# Altium footprint library custom-case.PcbLib: 483 footprints (part 6 of 31)
Each footprint in its own frame and in the unit in brackets; x right, y up, seen from the top. Pads: shape width x height; smd on the part's side, far side on the other; paste and mask are expansions set on the pad; w line width, h text height; cw(c..) or ccw(c..) is an arc to the next point about the centre after c.
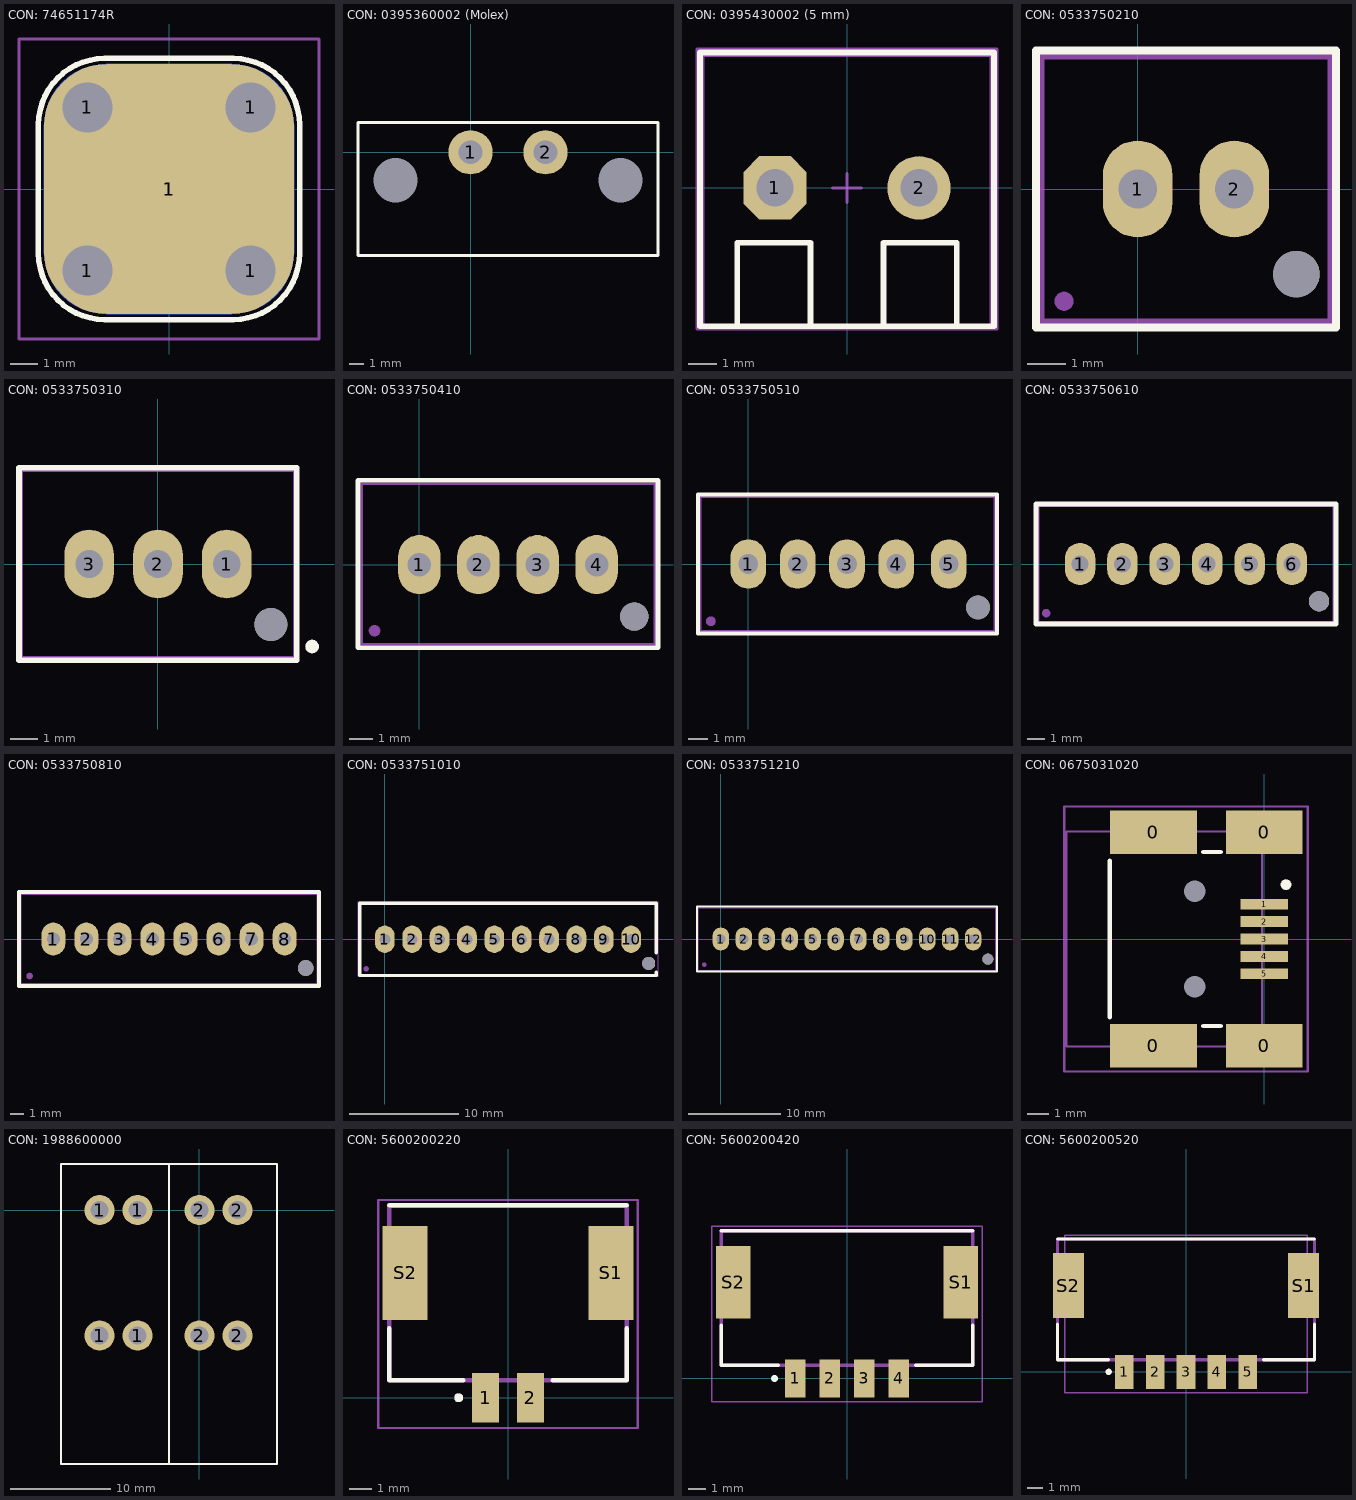
[diagram p5: the footprints below, top view; thin cyan lines are the x and y axes]

## CON: 74651174R [mm]
pads (6):
  round 2.5 hole 1.8: 1(-2.94,-2.94) 1(-2.94,2.94) 1(2.94,-2.94) 1(2.94,2.94)
  rrect50% 9x9 smd: 1(0,0)
  rrect50% 9x9 smd far side: 1(0,0)
Top Overlay:
  lines w0.2: -4.7,-2.31 ccw(c-2.31,-2.31) -2.31,-4.7 2.31,-4.7 ccw(c2.31,-2.31) 4.7,-2.31 4.7,2.31 ccw(c2.31,2.31) 2.31,4.7 -2.31,4.7 ccw(c-2.31,2.31) -4.7,2.31 -4.7,-2.31
Top Assy:
  circle w0.1: c0,0 r1.5
  lines w0.1: 0,2 ccw(c0,0) 2,0 ; -3.5,-3.5 -3.5,3.5 3.5,3.5 3.5,-3.5 -3.5,-3.5
Size Area:
  lines w0.1: -5.4,-5.4 -5.4,5.4 5.4,5.4 5.4,-5.4 -5.4,-5.4
3D body "74651174 (rev1).stp": height 8.5, standoff -2.5, extent -3.5,-3.5 3.5,3.5

## CON: 0395360002 (Molex) [mm]
pads (4):
  round 3 hole 1.6: 1(0,0) 2(5.08,0)
  round 0 hole 3: MH(-5.08,-1.9) MH(10.16,-1.9)
Top Overlay:
  lines w0.2: -7.625,-7 -7.625,2.025 12.7,2.025 12.7,-7 -7.625,-7
Top Assy:
  lines w0.1: -7.625,-7 12.7,-7 12.7,2.025 -7.625,2.025 -7.625,-7
Size Area:
  lines w0.1: -7.625,-7 -7.625,2.025 12.7,2.025 12.7,-7 -7.625,-7
3D body "395360002-1.STEP": height 8.47, standoff -3.72, extent -7.625,-10.07 12.695,2.02

## CON: 0395430002 (5 mm) [mm] "2 pin 5.08mm screw connector"
height 12.5
pads (2):
  oct 2.2x2.2 hole 1.3: 1(-2.5,0)
  round 2.2 hole 1.3: 2(2.5,0)
Top Overlay:
  lines w0.2: -3.81,-4.8 -3.81,-1.905 -1.27,-1.905 -1.27,-4.8 ; 1.27,-4.8 1.27,-1.905 3.81,-1.905 3.81,-4.8 ; -5.1,-4.8 -5.1,4.7 5.1,4.7 5.1,-4.8 -5.1,-4.8
Top Assy:
  lines w0.1: -3.8,-4.799 -3.8,-1.9 -1.3,-1.9 -1.3,-4.799 ; 1.3,-4.8 1.3,-1.9 3.8,-1.9 3.8,-4.799 ; -5.004,-4.799 5.004,-4.799 5.004,4.599 -5.004,4.599 -5.004,-4.799
Size Area:
  lines w0.1: -0.5,0 0.5,0 ; 0,-0.5 0,0.5 ; -5.207,-4.9 -5.207,4.826 5.207,4.826 5.207,-4.9 -5.207,-4.9
3D body "395430002.SLDPRT": height 14.63, standoff -3.43, extent -5.004,-4.799 5.004,4.599

## CON: 0533750210 [mm] "MOLEX Mini-Lock"
height 11.5
pads (4):
  oval 1.8x2.5 hole 1: 1(0,0) 2(2.5,0)
  round 0.5 on Mech1: ""(-1.9,-2.9)
  round 1.2 hole 1.2: ""(4.1,-2.2)
Top Overlay:
  lines w0.2: -2.625,-3.575 -2.625,3.575 5.125,3.575 5.125,-3.575 -2.625,-3.575
Top Assy:
  lines w0.1: -2.45,-3.4 -2.45,3.4 4.95,3.4 4.95,-3.4 -2.45,-3.4
Size Area:
  lines w0.1: -2.5,-3.5 5,-3.5 5,3.5 -2.5,3.5 -2.5,-3.5
3D body "533750210.stp": height 11.75, standoff -3.18, extent -2.45,-3.4 4.95,3.4

## CON: 0533750310 [mm]
pads (6):
  oval 1.8x2.5 hole 1: 1(2.5,0) 2(0,0) 3(-2.5,0)
  round 1.2 hole 1.2: ""(4.1,-2.2)
  round 0.5 on Mech1: ""(4.1,-2.2)
  round 0.5 on Top Overlay: ""(5.6,-3)
Top Overlay:
  lines w0.2: -5.05,-3.5 5.05,-3.5 5.05,3.5 -5.05,3.5 -5.05,-3.5
Top Assy:
  lines w0.1: -4.95,-3.4 -4.95,3.4 4.95,3.4 4.95,-3.4 -4.95,-3.4
Size Area:
  lines w0.1: -0.5,0 0.5,0 ; 0,-0.5 0,0.5 ; -5,-3.5 5,-3.5 5,3.5 -5,3.5 -5,-3.5
3D body "533750310.stp": height 11.55, standoff -3.38, extent -4.95,-3.4 4.95,3.4

## CON: 0533750410 [mm] "MOLEX Mini-Lock"
height 11.5
pads (6):
  oval 1.8x2.5 hole 1: 1(0,0) 2(2.5,0) 3(5,0) 4(7.5,0)
  round 0.5 on Mech1: ""(-1.9,-2.8)
  round 1.2 hole 1.2: ""(9.1,-2.2)
Top Overlay:
  lines w0.2: -2.6,-3.525 10.1,-3.525 10.1,3.575 -2.6,3.575 -2.6,-3.525
Top Assy:
  lines w0.1: -2.441,-3.374 9.959,-3.374 9.959,3.426 -2.441,3.426 -2.441,-3.374
3D body "533750410.stp": height 11.55, standoff -3.38, extent -2.441,-3.374 9.959,3.426

## CON: 0533750510 [mm] "MOLEX Mini-Lock"
height 11.5
pads (7):
  oval 1.8x2.5 hole 1: 1(0,0) 2(2.5,0) 3(5,0) 4(7.5,0) 5(10.16,0)
  round 0.5 on Mech1: ""(-1.9,-2.9)
  round 1.2 hole 1.2: ""(11.64,-2.2)
Top Overlay:
  lines w0.2: -2.55,-3.525 12.6,-3.525 12.6,3.525 -2.55,3.525 -2.55,-3.525
Top Assy:
  lines w0.1: -2.425,-3.4 -2.425,3.4 12.475,3.4 12.475,-3.4 -2.425,-3.4
Size Area:
  lines w0.1: -2.6,-3.5 12.6,-3.5 12.6,3.5 -2.6,3.5 -2.6,-3.5
3D body "533750510.stp": height 11.55, standoff -3.38, extent -2.425,-3.4 12.475,3.4

## CON: 0533750610 [mm] "MOLEX Mini-Lock"
height 11.5
pads (8):
  oval 1.8x2.5 hole 1: 1(10,0) 2(12.5,0) 3(15,0) 4(17.5,0) 5(20,0) 6(22.5,0)
  round 0.5 on Mech1: ""(8,-2.9)
  round 1.2 hole 1.2: ""(24.1,-2.2)
Top Overlay:
  lines w0.3: 7.4,-3.55 25.1,-3.55 25.1,3.55 7.4,3.55 7.4,-3.55
Top Assy:
  lines w0.1: 7.55,-3.4 7.55,3.4 24.95,3.4 24.95,-3.4 7.55,-3.4
3D body "533750610.stp": height 11.55, standoff -3.38, extent 7.55,-3.4 24.95,3.4

## CON: 0533750810 [mm] "MOLEX Mini-Lock"
height 11.5
pads (10):
  oval 1.8x2.5 hole 1: 1(5,0) 2(7.5,0) 3(10,0) 4(12.5,0) 5(15,0) 6(17.5,0) 7(20,0) 8(22.5,0)
  round 0.5 on Mech1: ""(3.2,-2.8)
  round 1.2 hole 1.2: ""(24.1,-2.2)
Top Overlay:
  lines w0.3: 2.4,-3.55 2.4,3.55 25.1,3.55 25.1,-3.55 2.4,-3.55
Top Assy:
  lines w0.1: 2.55,-3.4 2.55,3.4 24.95,3.4 24.95,-3.4 2.55,-3.4
3D body "533750810.stp": height 11.55, standoff -3.38, extent 2.55,-3.4 24.95,3.4

## CON: 0533751010 [mm] "MOLEX Mini-Lock"
height 11.5
pads (12):
  oval 1.8x2.5 hole 1: 1(0,0) 2(2.5,0) 3(5,0) 4(7.5,0) 5(10,0) 6(12.5,0) 7(15,0) 8(17.5,0) 9(20,0) 10(22.5,0)
  round 0.5 on Mech1: ""(-1.7,-2.7)
  round 1.2 hole 1.2: ""(24.1,-2.2)
Top Overlay:
  lines w0.3: 24.8,-3 24.8,-3.3 -2.3,-3.3 -2.3,3.3 24.8,3.3 24.8,-1.25
Top Assy:
  lines w0.1: -2.448,-3.374 24.952,-3.374 24.952,3.426 -2.448,3.426 -2.448,-3.374
3D body "533751010.stp": height 11.55, standoff -3.38, extent -2.448,-3.374 24.952,3.426

## CON: 0533751210 [mm] "MOLEX Mini-Lock"
height 11.5
pads (14):
  oval 1.8x2.5 hole 1: 1(0,0) 2(2.5,0) 3(5,0) 4(7.5,0) 5(10,0) 6(12.5,0) 7(15,0) 8(17.5,0) 9(20,0) 10(22.5,0) 11(25,0) 12(27.5,0)
  round 0.5 on Mech1: ""(-1.8,-2.8)
  round 1.2 hole 1.2: ""(29.1,-2.2)
Top Overlay:
  lines w0.254: -2.6,-3.55 -2.6,3.55 30.1,3.55 30.1,-3.55 -2.6,-3.55
Top Assy:
  lines w0.1: -2.45,-3.4 -2.45,3.4 29.95,3.4 29.95,-3.4 -2.45,-3.4
3D body "533751210.stp": height 11.55, standoff -3.38, extent -2.45,-3.4 29.95,3.4

## CON: 0675031020 [mm]
pads (13):
  rect 4x2 smd: 0(-5.1,-4.9) 0(-5.1,4.9)
  rect 3.5x2 smd: 0(0,-4.9) 0(0,4.9)
  rect 2.2x0.5 smd: 1(0,1.6) 2(0,0.8) 3(0,0) 4(0,-0.8) 5(0,-1.6)
  round 0 hole 1: ""(-3.2,-2.2) ""(-3.2,2.2)
  round 0.5 on Mech1: ""(-0.6,4.5)
  round 0.5 on Top Overlay: ""(1,2.5)
Top Overlay:
  lines w0.2: -7.1,-3.6 -7.1,3.6 ; -2.8,-4 -2,-4 ; -2.8,4 -2,4
Top Assy:
  lines w0.1: -9.1,-4.95 -0.1,-4.95 -0.1,4.95 -9.1,4.95 -9.1,-4.95
Size Area:
  lines w0.1: -9.2,-6.1 2,-6.1 2,6.1 -9.2,6.1 -9.2,-6.1
3D body "675031020.stp": height 3.95, standoff -1, extent -9.1,-4.95 -0.1,4.95

## CON: 1988600000 [mm]
pads (8):
  round 3 hole 1.8: 1(-9.95,-12.5) 1(-9.95,0) 1(-6.15,-12.5) 1(-6.15,0) 2(0,-12.5) 2(0,0) 2(3.8,-12.5) 2(3.8,0)
Top Overlay:
  lines w0.2: -3.025,-25.3 -3.025,4.602 ; -13.812,-25.3 -13.812,4.602 7.762,4.602 7.762,-25.3 -13.812,-25.3
Top Assy:
  lines w0.1: -3.025,-25.3 -3.025,4.602 ; -13.812,-25.3 7.762,-25.3 7.762,4.602 -13.812,4.602 -13.812,-25.3
Size Area:
  lines w0.1: -13.812,-25.3 7.762,-25.3 7.762,4.602 -13.812,4.602 -13.812,-25.3
3D body "1988600000.stp": height 41.24, standoff -5, extent -13.812,-25.3 7.762,4.602

## CON: 5600200220 [mm]
height 3.1
pads (4):
  rect 1.2x2.2 smd: 1(-1,0) 2(1,0)
  rect 2x4.2 smd: S1(4.6,5.58) S2(-4.6,5.58)
Top Overlay:
  circle w0.2: c-2.2,0 r0.1
  lines w0.2: -5.3,3.1 -5.3,0.78 -2,0.78 ; -5.3,8.6 5.3,8.6 ; 2,0.78 5.3,0.78 5.3,3.1
3D model:
  circle w0.2: c-2.2,0 r0.1
  lines w0.2: -5.3,0.78 5.3,0.78 5.3,8.58 -5.3,8.58 -5.3,0.78
Size Area:
  lines w0.1: -5.8,-1.35 5.8,-1.35 5.8,2.58 5.8,8.83 -5.8,8.83 -5.8,2.58 -5.8,-1.35
3D body "5600200220.STEP": height 8, standoff 0, extent -5.45,-0.59 5.45,8.56

## CON: 5600200420 [mm]
pads (6):
  rect 1.2x2.2 smd: 1(-3,0) 2(-1,0) 3(1,0) 4(3,0)
  rect 2x4.2 smd: S1(6.6,5.58) S2(-6.6,5.58)
Top Overlay:
  circle w0.2: c-4.2,0 r0.1
  lines w0.2: -7.3,3.1 -7.3,0.78 -4,0.78 ; -7.3,8.58 7.3,8.58 ; 4,0.78 7.3,0.78 7.3,3.1
3D model:
  circle w0.2: c-4.2,0 r0.1
  lines w0.2: -7.3,0.78 -7.3,8.58 7.3,8.58 7.3,0.78 -7.3,0.78
Size Area:
  lines w0.1: -7.85,-1.35 -7.85,0.53 -7.85,8.83 7.85,8.83 7.85,0.53 7.85,-1.35 -7.85,-1.35
3D body "5600200420(4pin).STEP": height 8, standoff 0, extent -7.3,-0.59 7.3,8.56

## CON: 5600200520 [mm]
pads (7):
  rect 1.2x2.2 smd: 1(-4,0) 2(-2,0) 3(0,0) 4(2,0) 5(4,0)
  rect 2x4.2 smd: S1(7.6,5.58) S2(-7.6,5.58)
Top Overlay:
  circle w0.2: c-5,0 r0.1
  lines w0.2: -8.3,3.1 -8.3,0.78 -5,0.78 ; -8.3,8.6 8.3,8.6 ; 5,0.78 8.3,0.78 8.3,3.1
3D model:
  circle w0.2: c-5,0 r0.1
  lines w0.2: -8.3,0.78 -8.3,8.58 8.3,8.58 8.3,0.78 -8.3,0.78
Size Area:
  lines w0.1: -7.85,-1.35 -7.85,0.53 -7.85,8.83 7.85,8.83 7.85,0.53 7.85,-1.35 -7.85,-1.35
3D body "5600200520.STEP": height 8, standoff 0, extent -8.3,-0.57 8.3,8.58